# Altium footprint library MIC2930012WUTR.PcbLib: 1 footprints
Each footprint in its own frame and in the unit in brackets; x right, y up, seen from the top. Pads: shape width x height; smd on the part's side, far side on the other; paste and mask are expansions set on the pad; w line width, h text height; cw(c..) or ccw(c..) is an arc to the next point about the centre after c.
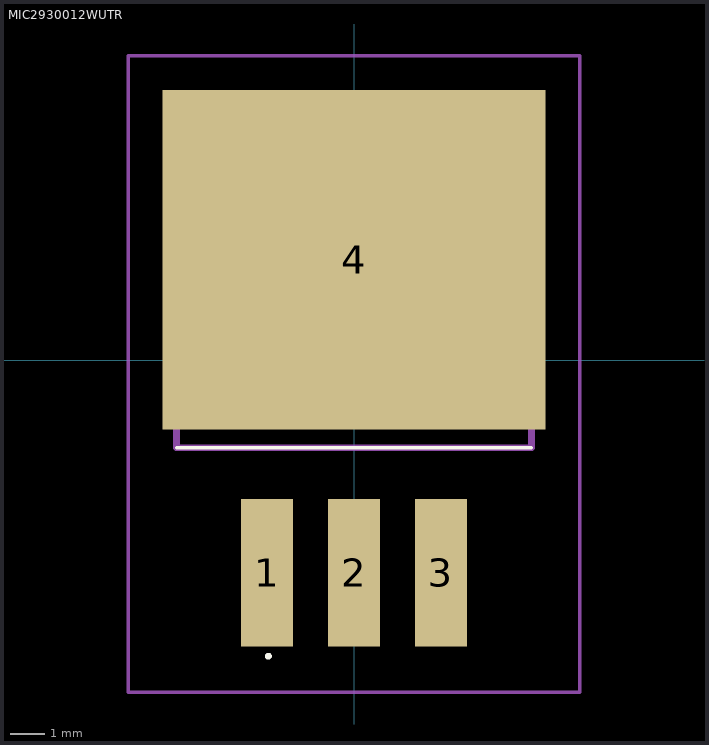
[diagram p0: the footprint, top view; thin cyan lines are the x and y axes]

## MIC2930012WUTR [mil]
pads (4):
  rect 60x170 smd: 1(-100,-244.61) 2(0,-244.61) 3(100,-244.61)
  rect 440x390 smd: 4(0,115.39)
Top Overlay:
  lines w3.94: -203.98,-100.87 203.98,-100.87 ; -98.43,-342.52 ccw(c-98.43,-340.55) -98.43,-338.58 ; -98.43,-342.52 -98.43,-342.52 ; -98.43,-342.52 cw(c-98.43,-340.55) -98.43,-338.58 ; -98.43,-338.58 -98.43,-338.58
Mechanical 15:
  lines w7.87: -203.98,-100.87 203.98,-100.87 203.98,244.61 -203.98,244.61 -203.98,-100.87
Mechanical 20:
  lines w3.94: -259.37,-381.89 259.37,-381.89 259.37,349.76 -259.37,349.76 -259.37,-381.89